# Altium schematic symbol library PCB_Jumper.SchLib: 1 symbol
Pins are listed as number, name and electrical type; pins without a type are passive.

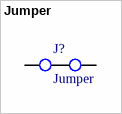
[diagram p0: symbol Jumper]

## Jumper
designator J?
footprint J_15x5
footprint J_20X5
footprint J_25X5
footprint J_30X5
footprint J_25_15
pins: 1, 2